# Altium footprint library 2019-09-10_09-01-25.PcbLib: 3 footprints
Each footprint in its own frame and in the unit in brackets; x right, y up, seen from the top. Pads: shape width x height; smd on the part's side, far side on the other; paste and mask are expansions set on the pad; w line width, h text height; cw(c..) or ccw(c..) is an arc to the next point about the centre after c.
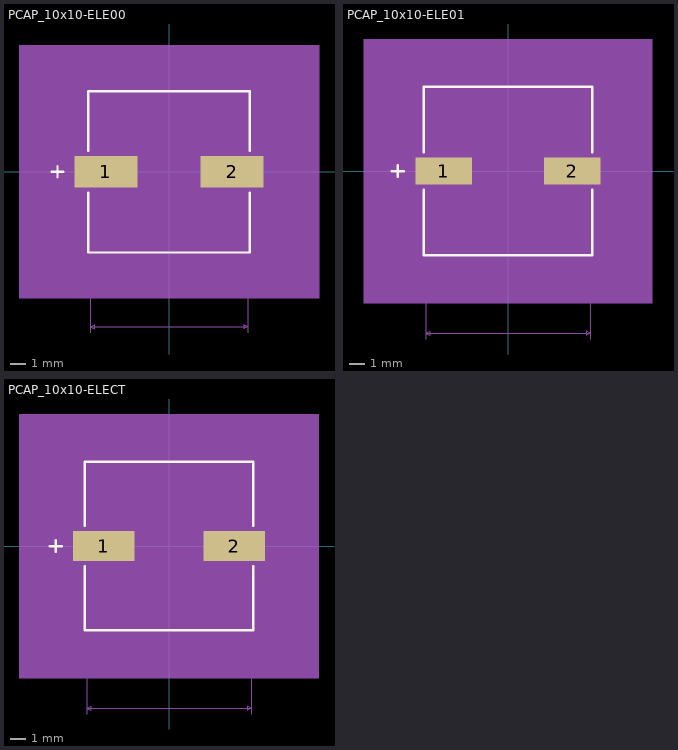
[diagram p0: the footprints below, top view; thin cyan lines are the x and y axes]

## PCAP_10x10-ELE00 [mil]
pads (2):
  rect 166x83 smd paste+0 mask+0: 1(-165.5,0) 2(165.5,0)
Top Overlay:
  lines w6: -307.5,0 -277.5,0 ; -292.5,-15 -292.5,15 ; -211.5,-54.6 -211.5,-211.5 211.5,-211.5 211.5,-54.6 ; -211.5,54.6 -211.5,211.5 211.5,211.5 211.5,54.6
Mechanical 5:
  region: 393.5,-331.5 -393.5,-331.5 -393.5,331.5 393.5,331.5
Mechanical 7:
  lines w1: -321.5,-206.5 -206.5,-206.5 -206.5,-421.5 ; -321.5,206.5 -206.5,206.5 ; -270.5,-306.5 -220.5,-306.5 ; -220.5,-321.5 -220.5,-51.5 ; -220.5,51.5 -220.5,321.5 ; -82.5,-321.5 -82.5,-31.5 ; -32.5,-306.5 -82.5,-306.5 ; 206.5,-421.5 206.5,-206.5 ; 220.5,51.5 220.5,321.5 ; 258.5,-21.5 363.5,-21.5 ; 258.5,21.5 363.5,21.5 ; 348.5,-71.5 348.5,-21.5 ; 348.5,71.5 348.5,21.5 ; -306.5,-206.5 -306.5,206.5 ; -306.5,-206.5 -311.5,-196.5 -301.5,-196.5 -306.5,-206.5 ; -306.5,206.5 -311.5,196.5 -301.5,196.5 -306.5,206.5 ; -220.5,-306.5 -230.5,-301.5 -230.5,-311.5 -220.5,-306.5 ; -220.5,306.5 220.5,306.5 ; -220.5,306.5 -210.5,311.5 -210.5,301.5 -220.5,306.5 ; -206.5,-406.5 206.5,-406.5 ; -206.5,-406.5 -196.5,-401.5 -196.5,-411.5 -206.5,-406.5 ; -82.5,-306.5 -72.5,-301.5 -72.5,-311.5 -82.5,-306.5 ; 206.5,-406.5 196.5,-401.5 196.5,-411.5 206.5,-406.5 ; 220.5,306.5 210.5,311.5 210.5,301.5 220.5,306.5 ; 348.5,-21.5 343.5,-31.5 353.5,-31.5 348.5,-21.5 ; 348.5,21.5 343.5,31.5 353.5,31.5 348.5,21.5
  text "Default Padstyle: RX166Y83D0T" at -362.5,-433.5 h50
  text "Alternate 1 Padstyle: OX60Y90D30P" at -412.5,-533.5 h50
  text "Alternate 2 Padstyle: OX90Y60D30P" at -412.5,-633.5 h50
  text "0.043in/1.092mm" at 368.5,-12.5 h25
  text "0.441in/11.201mm" at -100,326.5 h25
  text "0.413in/10.49mm" at -514,-12.5 h25
  text "0.13in/3.302mm" at -239,-351.5 h25
  text "0.413in/10.49mm" at -93.75,-451.5 h25
Mechanical 13:
  lines w1: -307.5,0 -277.5,0 ; -292.5,-15 -292.5,15 ; -206.5,-103.25 -103.25,-206.5 ; -206.5,103.25 -103.25,206.5 ; -206.5,-206.5 206.5,-206.5 206.5,206.5 -206.5,206.5 -206.5,-206.5
Mechanical 15:
  region: -226.5,-61.5 -268.5,-61.5 -268.5,61.5 -226.5,61.5 -226.5,226.5 226.5,226.5 226.5,61.5 268.5,61.5 268.5,-61.5 226.5,-61.5 226.5,-226.5 -226.5,-226.5
  lines w6: -268.5,-61.5 -268.5,61.5 -226.5,61.5 -226.5,226.5 226.5,226.5 226.5,61.5 268.5,61.5 268.5,-61.5 226.5,-61.5 226.5,-226.5 -226.5,-226.5 -226.5,-61.5 -268.5,-61.5
3D body: height 10, standoff 0, extent 0,0 10,10

## PCAP_10x10-ELE01 [mil]
pads (2):
  rect 142x67 smd paste+0 mask+0: 1(-161.5,0) 2(161.5,0)
Top Overlay:
  lines w6: -291.5,0 -261.5,0 ; -276.5,-15 -276.5,15 ; -211.5,-46.6 -211.5,-211.5 211.5,-211.5 211.5,-46.6 ; -211.5,46.6 -211.5,211.5 211.5,211.5 211.5,46.6
Mechanical 5:
  region: 361.5,-331.5 -361.5,-331.5 -361.5,331.5 361.5,331.5
Mechanical 7:
  lines w1: -321.5,-206.5 -206.5,-206.5 -206.5,-421.5 ; -321.5,206.5 -206.5,206.5 ; -270.5,-306.5 -220.5,-306.5 ; -220.5,-321.5 -220.5,-43.5 ; -220.5,43.5 -220.5,321.5 ; -82.5,-321.5 -82.5,-23.5 ; -32.5,-306.5 -82.5,-306.5 ; 206.5,-421.5 206.5,-206.5 ; 220.5,43.5 220.5,321.5 ; 242.5,-21.5 347.5,-21.5 ; 242.5,21.5 347.5,21.5 ; 332.5,-71.5 332.5,-21.5 ; 332.5,71.5 332.5,21.5 ; -306.5,-206.5 -306.5,206.5 ; -306.5,-206.5 -311.5,-196.5 -301.5,-196.5 -306.5,-206.5 ; -306.5,206.5 -311.5,196.5 -301.5,196.5 -306.5,206.5 ; -220.5,-306.5 -230.5,-301.5 -230.5,-311.5 -220.5,-306.5 ; -220.5,306.5 220.5,306.5 ; -220.5,306.5 -210.5,311.5 -210.5,301.5 -220.5,306.5 ; -206.5,-406.5 206.5,-406.5 ; -206.5,-406.5 -196.5,-401.5 -196.5,-411.5 -206.5,-406.5 ; -82.5,-306.5 -72.5,-301.5 -72.5,-311.5 -82.5,-306.5 ; 206.5,-406.5 196.5,-401.5 196.5,-411.5 206.5,-406.5 ; 220.5,306.5 210.5,311.5 210.5,301.5 220.5,306.5 ; 332.5,-21.5 327.5,-31.5 337.5,-31.5 332.5,-21.5 ; 332.5,21.5 327.5,31.5 337.5,31.5 332.5,21.5
  text "Default Padstyle: RX142Y67D0T" at -362.5,-441.5 h50
  text "Alternate 1 Padstyle: OX60Y90D30P" at -412.5,-541.5 h50
  text "Alternate 2 Padstyle: OX90Y60D30P" at -412.5,-641.5 h50
  text "0.043in/1.092mm" at 352.5,-12.5 h25
  text "0.441in/11.201mm" at -100,326.5 h25
  text "0.413in/10.49mm" at -514,-12.5 h25
  text "0.13in/3.302mm" at -239,-351.5 h25
  text "0.413in/10.49mm" at -93.75,-451.5 h25
Mechanical 13:
  lines w1: -291.5,0 -261.5,0 ; -276.5,-15 -276.5,15 ; -206.5,-103.25 -103.25,-206.5 ; -206.5,103.25 -103.25,206.5 ; -206.5,-206.5 206.5,-206.5 206.5,206.5 -206.5,206.5 -206.5,-206.5
Mechanical 15:
  region: -210.5,-37.5 -236.5,-37.5 -236.5,37.5 -210.5,37.5 -210.5,210.5 210.5,210.5 210.5,37.5 236.5,37.5 236.5,-37.5 210.5,-37.5 210.5,-210.5 -210.5,-210.5
  lines w6: -236.5,-37.5 -236.5,37.5 -210.5,37.5 -210.5,210.5 210.5,210.5 210.5,37.5 236.5,37.5 236.5,-37.5 210.5,-37.5 210.5,-210.5 -210.5,-210.5 -210.5,-37.5 -236.5,-37.5
3D body: height 10, standoff 0, extent 0,0 10,10

## PCAP_10x10-ELECT [mil]
pads (2):
  rect 154x75 smd paste+0 mask+0: 1(-163.5,0) 2(163.5,0)
Top Overlay:
  lines w6: -299.5,0 -269.5,0 ; -284.5,-15 -284.5,15 ; -211.5,-50.6 -211.5,-211.5 211.5,-211.5 211.5,-50.6 ; -211.5,50.6 -211.5,211.5 211.5,211.5 211.5,50.6
Mechanical 5:
  region: 375.5,-331.5 -375.5,-331.5 -375.5,331.5 375.5,331.5
Mechanical 7:
  lines w1: -321.5,-206.5 -206.5,-206.5 -206.5,-421.5 ; -321.5,206.5 -206.5,206.5 ; -270.5,-306.5 -220.5,-306.5 ; -220.5,-321.5 -220.5,-47.5 ; -220.5,47.5 -220.5,321.5 ; -82.5,-321.5 -82.5,-27.5 ; -32.5,-306.5 -82.5,-306.5 ; 206.5,-421.5 206.5,-206.5 ; 220.5,47.5 220.5,321.5 ; 250.5,-21.5 355.5,-21.5 ; 250.5,21.5 355.5,21.5 ; 340.5,-71.5 340.5,-21.5 ; 340.5,71.5 340.5,21.5 ; -306.5,-206.5 -306.5,206.5 ; -306.5,-206.5 -311.5,-196.5 -301.5,-196.5 -306.5,-206.5 ; -306.5,206.5 -311.5,196.5 -301.5,196.5 -306.5,206.5 ; -220.5,-306.5 -230.5,-301.5 -230.5,-311.5 -220.5,-306.5 ; -220.5,306.5 220.5,306.5 ; -220.5,306.5 -210.5,311.5 -210.5,301.5 -220.5,306.5 ; -206.5,-406.5 206.5,-406.5 ; -206.5,-406.5 -196.5,-401.5 -196.5,-411.5 -206.5,-406.5 ; -82.5,-306.5 -72.5,-301.5 -72.5,-311.5 -82.5,-306.5 ; 206.5,-406.5 196.5,-401.5 196.5,-411.5 206.5,-406.5 ; 220.5,306.5 210.5,311.5 210.5,301.5 220.5,306.5 ; 340.5,-21.5 335.5,-31.5 345.5,-31.5 340.5,-21.5 ; 340.5,21.5 335.5,31.5 345.5,31.5 340.5,21.5
  text "Default Padstyle: RX154Y75D0T" at -362.5,-437.5 h50
  text "Alternate 1 Padstyle: OX60Y90D30P" at -412.5,-537.5 h50
  text "Alternate 2 Padstyle: OX90Y60D30P" at -412.5,-637.5 h50
  text "0.043in/1.092mm" at 360.5,-12.5 h25
  text "0.441in/11.201mm" at -100,326.5 h25
  text "0.413in/10.49mm" at -514,-12.5 h25
  text "0.13in/3.302mm" at -239,-351.5 h25
  text "0.413in/10.49mm" at -93.75,-451.5 h25
Mechanical 13:
  lines w1: -299.5,0 -269.5,0 ; -284.5,-15 -284.5,15 ; -206.5,-103.25 -103.25,-206.5 ; -206.5,103.25 -103.25,206.5 ; -206.5,-206.5 206.5,-206.5 206.5,206.5 -206.5,206.5 -206.5,-206.5
Mechanical 15:
  region: -216.5,-47.5 -250.5,-47.5 -250.5,47.5 -216.5,47.5 -216.5,216.5 216.5,216.5 216.5,47.5 250.5,47.5 250.5,-47.5 216.5,-47.5 216.5,-216.5 -216.5,-216.5
  lines w6: -250.5,-47.5 -250.5,47.5 -216.5,47.5 -216.5,216.5 216.5,216.5 216.5,47.5 250.5,47.5 250.5,-47.5 216.5,-47.5 216.5,-216.5 -216.5,-216.5 -216.5,-47.5 -250.5,-47.5
3D body: height 10, standoff 0, extent 0,0 10,10